# Altium footprint library Bluetechnix_Footprint_CM-BF548.PcbLib: 1 footprints
Each footprint in its own frame and in the unit in brackets; x right, y up, seen from the top. Pads: shape width x height; smd on the part's side, far side on the other; paste and mask are expansions set on the pad; w line width, h text height; cw(c..) or ccw(c..) is an arc to the next point about the centre after c.
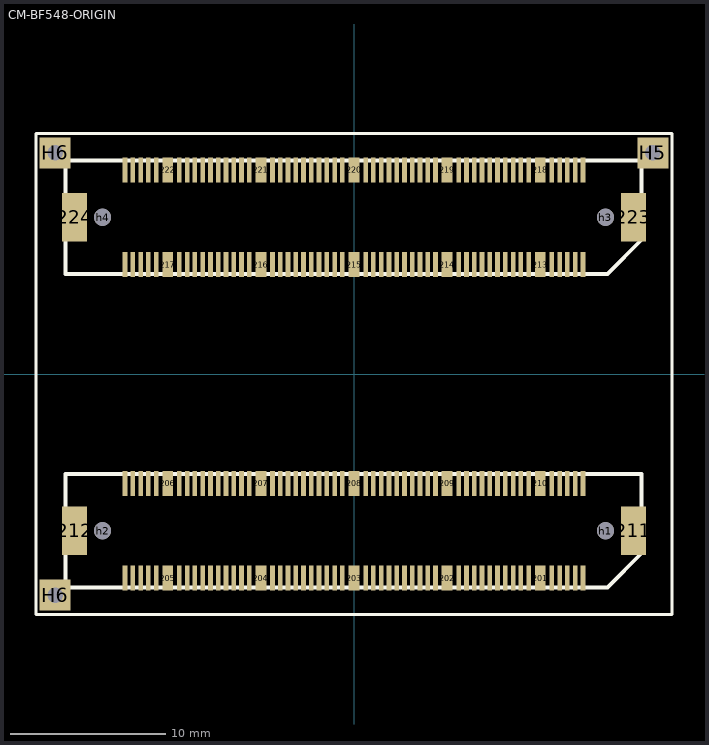
[diagram p0: the footprint, top view; thin cyan lines are the x and y axes]

## CM-BF548-ORIGIN [mm]
height 7
pads (231):
  rect 0.3x1.6 smd paste-0.03: 1(14.75,-13.15) 2(14.25,-13.15) 3(13.75,-13.15) 4(13.25,-13.15) 5(12.75,-13.15) 6(11.25,-13.15) 7(10.75,-13.15) 8(10.25,-13.15) 9(9.75,-13.15) 10(9.25,-13.15) 11(8.75,-13.15) 12(8.25,-13.15) 13(7.75,-13.15) 14(7.25,-13.15) 15(6.75,-13.15) 16(5.25,-13.15) 17(4.75,-13.15) 18(4.25,-13.15) 19(3.75,-13.15) 20(3.25,-13.15) 21(2.75,-13.15) 22(2.25,-13.15) 23(1.75,-13.15) 24(1.25,-13.15) 25(0.75,-13.15) 26(-0.75,-13.15) 27(-1.25,-13.15) 28(-1.75,-13.15) 29(-2.25,-13.15) 30(-2.75,-13.15) 31(-3.25,-13.15) 32(-3.75,-13.15) 33(-4.25,-13.15) 34(-4.75,-13.15) 35(-5.25,-13.15) 36(-6.75,-13.15) 37(-7.25,-13.15) 38(-7.75,-13.15) 39(-8.25,-13.15) 40(-8.75,-13.15) 41(-9.25,-13.15) 42(-9.75,-13.15) 43(-10.25,-13.15) 44(-10.75,-13.15) 45(-11.25,-13.15) 46(-12.75,-13.15) 47(-13.25,-13.15) 48(-13.75,-13.15) 49(-14.25,-13.15) 50(-14.75,-13.15) 51(-14.75,-7.05) 52(-14.25,-7.05) 53(-13.75,-7.05) 54(-13.25,-7.05) 55(-12.75,-7.05) 56(-11.25,-7.05) 57(-10.75,-7.05) 58(-10.25,-7.05) 59(-9.75,-7.05) 60(-9.25,-7.05) 61(-8.75,-7.05) 62(-8.25,-7.05) 63(-7.75,-7.05) 64(-7.25,-7.05) 65(-6.75,-7.05) 66(-5.25,-7.05) 67(-4.75,-7.05) 68(-4.25,-7.05) 69(-3.75,-7.05) 70(-3.25,-7.05) 71(-2.75,-7.05) 72(-2.25,-7.05) 73(-1.75,-7.05) 74(-1.25,-7.05) 75(-0.75,-7.05) 76(0.75,-7.05) 77(1.25,-7.05) 78(1.75,-7.05) 79(2.25,-7.05) 80(2.75,-7.05) 81(3.25,-7.05) 82(3.75,-7.05) 83(4.25,-7.05) 84(4.75,-7.05) 85(5.25,-7.05) 86(6.75,-7.05) 87(7.25,-7.05) 88(7.75,-7.05) 89(8.25,-7.05) 90(8.75,-7.05) 91(9.25,-7.05) 92(9.75,-7.05) 93(10.25,-7.05) 94(10.75,-7.05) 95(11.25,-7.05) 96(12.75,-7.05) 97(13.25,-7.05) 98(13.75,-7.05) 99(14.25,-7.05) 100(14.75,-7.05) 101(14.75,7.05) 102(14.25,7.05) 103(13.75,7.05) 104(13.25,7.05) 105(12.75,7.05) 106(11.25,7.05) 107(10.75,7.05) 108(10.25,7.05) 109(9.75,7.05) 110(9.25,7.05) 111(8.75,7.05) 112(8.25,7.05) 113(7.75,7.05) 114(7.25,7.05) 115(6.75,7.05) 116(5.25,7.05) 117(4.75,7.05) 118(4.25,7.05) 119(3.75,7.05) 120(3.25,7.05) 121(2.75,7.05) 122(2.25,7.05) 123(1.75,7.05) 124(1.25,7.05) 125(0.75,7.05) 126(-0.75,7.05) 127(-1.25,7.05) 128(-1.75,7.05) 129(-2.25,7.05) 130(-2.75,7.05) 131(-3.25,7.05) 132(-3.75,7.05) 133(-4.25,7.05) 134(-4.75,7.05) 135(-5.25,7.05) 136(-6.75,7.05) 137(-7.25,7.05) 138(-7.75,7.05) 139(-8.25,7.05) 140(-8.75,7.05) 141(-9.25,7.05) 142(-9.75,7.05) 143(-10.25,7.05) 144(-10.75,7.05) 145(-11.25,7.05) 146(-12.75,7.05) 147(-13.25,7.05) 148(-13.75,7.05) 149(-14.25,7.05) 150(-14.75,7.05) 151(-14.75,13.15) 152(-14.25,13.15) 153(-13.75,13.15) 154(-13.25,13.15) 155(-12.75,13.15) 156(-11.25,13.15) 157(-10.75,13.15) 158(-10.25,13.15) 159(-9.75,13.15) 160(-9.25,13.15) 161(-8.75,13.15) 162(-8.25,13.15) 163(-7.75,13.15) 164(-7.25,13.15) 165(-6.75,13.15) 166(-5.25,13.15) 167(-4.75,13.15) 168(-4.25,13.15) 169(-3.75,13.15) 170(-3.25,13.15) 171(-2.75,13.15) 172(-2.25,13.15) 173(-1.75,13.15) 174(-1.25,13.15) 175(-0.75,13.15) 176(0.75,13.15) 177(1.25,13.15) 178(1.75,13.15) 179(2.25,13.15) 180(2.75,13.15) 181(3.25,13.15) 182(3.75,13.15) 183(4.25,13.15) 184(4.75,13.15) 185(5.25,13.15) 186(6.75,13.15) 187(7.25,13.15) 188(7.75,13.15) 189(8.25,13.15) 190(8.75,13.15) 191(9.25,13.15) 192(9.75,13.15) 193(10.25,13.15) 194(10.75,13.15) 195(11.25,13.15) 196(12.75,13.15) 197(13.25,13.15) 198(13.75,13.15) 199(14.25,13.15) 200(14.75,13.15)
  rect 0.7x1.6 smd paste-0.03: 201(12,-13.15) 202(6,-13.15) 203(0,-13.15) 204(-6,-13.15) 205(-12,-13.15) 206(-12,-7.05) 207(-6,-7.05) 208(0,-7.05) 209(6,-7.05) 210(12,-7.05) 213(12,7.05) 214(6,7.05) 215(0,7.05) 216(-6,7.05) 217(-12,7.05) 218(12,13.15) 219(6,13.15) 220(0,13.15) 221(-6,13.15) 222(-12,13.15)
  rect 1.6x3.1 smd: 211(18,-10.1) 212(-18,-10.1) 223(18,10.1) 224(-18,10.1)
  round 1.1 hole 1.1 unplated: h1(16.2,-10.1) h2(-16.2,-10.1) h3(16.2,10.1) h4(-16.2,10.1)
  rect 2x2 hole 1: H5(19.25,14.25) H6(-19.25,-14.25) H6(-19.25,14.25)
Top Overlay:
  lines w0.2: -20.5,-15.5 -20.5,15.5 20.5,15.5 20.5,-15.5 -20.5,-15.5
  lines w0.254: -18.575,-13.75 -18.575,-6.45 18.525,-6.45 18.525,-11.55 16.325,-13.75 -18.575,-13.75 ; -18.575,6.45 16.325,6.45 18.525,8.65 18.525,13.75 -18.575,13.75 -18.575,6.45